# Altium integrated library Cap-1206.IntLib: 1 symbol
Pins are listed as number, name and electrical type; pins without a type are passive.

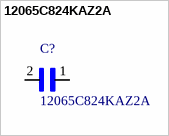
[diagram p0: symbol 12065C824KAZ2A]

## 12065C824KAZ2A
designator C?
Cap Ceramic 0.82uF 50V X7R 10% SMD 1206 125Ã‚Â°C Paper T/R; MF: AVX; Package: 1206 AVX; SnapEDA_Link: https://www.snapeda.com/parts/12065C824KAZ2A/AVX/view-part/?ref=snap; MP: 12065C824KAZ2A; Price: None; Availability: Unavailable; Value: *
footprint *CAPC320160X94
pins: 1, 2